# Altium integrated library 2N7002KW.IntLib: 1 symbol
Pins are listed as number, name and electrical type; pins without a type are passive.

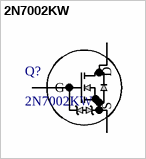
[diagram p0: symbol 2N7002KW]

## 2N7002KW
designator Q?
Description; Manufacturer_Name: onsemi; Copyright: Copyright (C) 2026 Ultra Librarian. All rights reserved.; Manufacturer_Part_Number: 2N7002KW
footprint SC-70_419AB-01_OSI
pins: 1 G, 2 S, 3 D